# Altium footprint library amirlib.PcbLib: 456 footprints (part 7 of 29)
Each footprint in its own frame and in the unit in brackets; x right, y up, seen from the top. Pads: shape width x height; smd on the part's side, far side on the other; paste and mask are expansions set on the pad; w line width, h text height; cw(c..) or ccw(c..) is an arc to the next point about the centre after c.
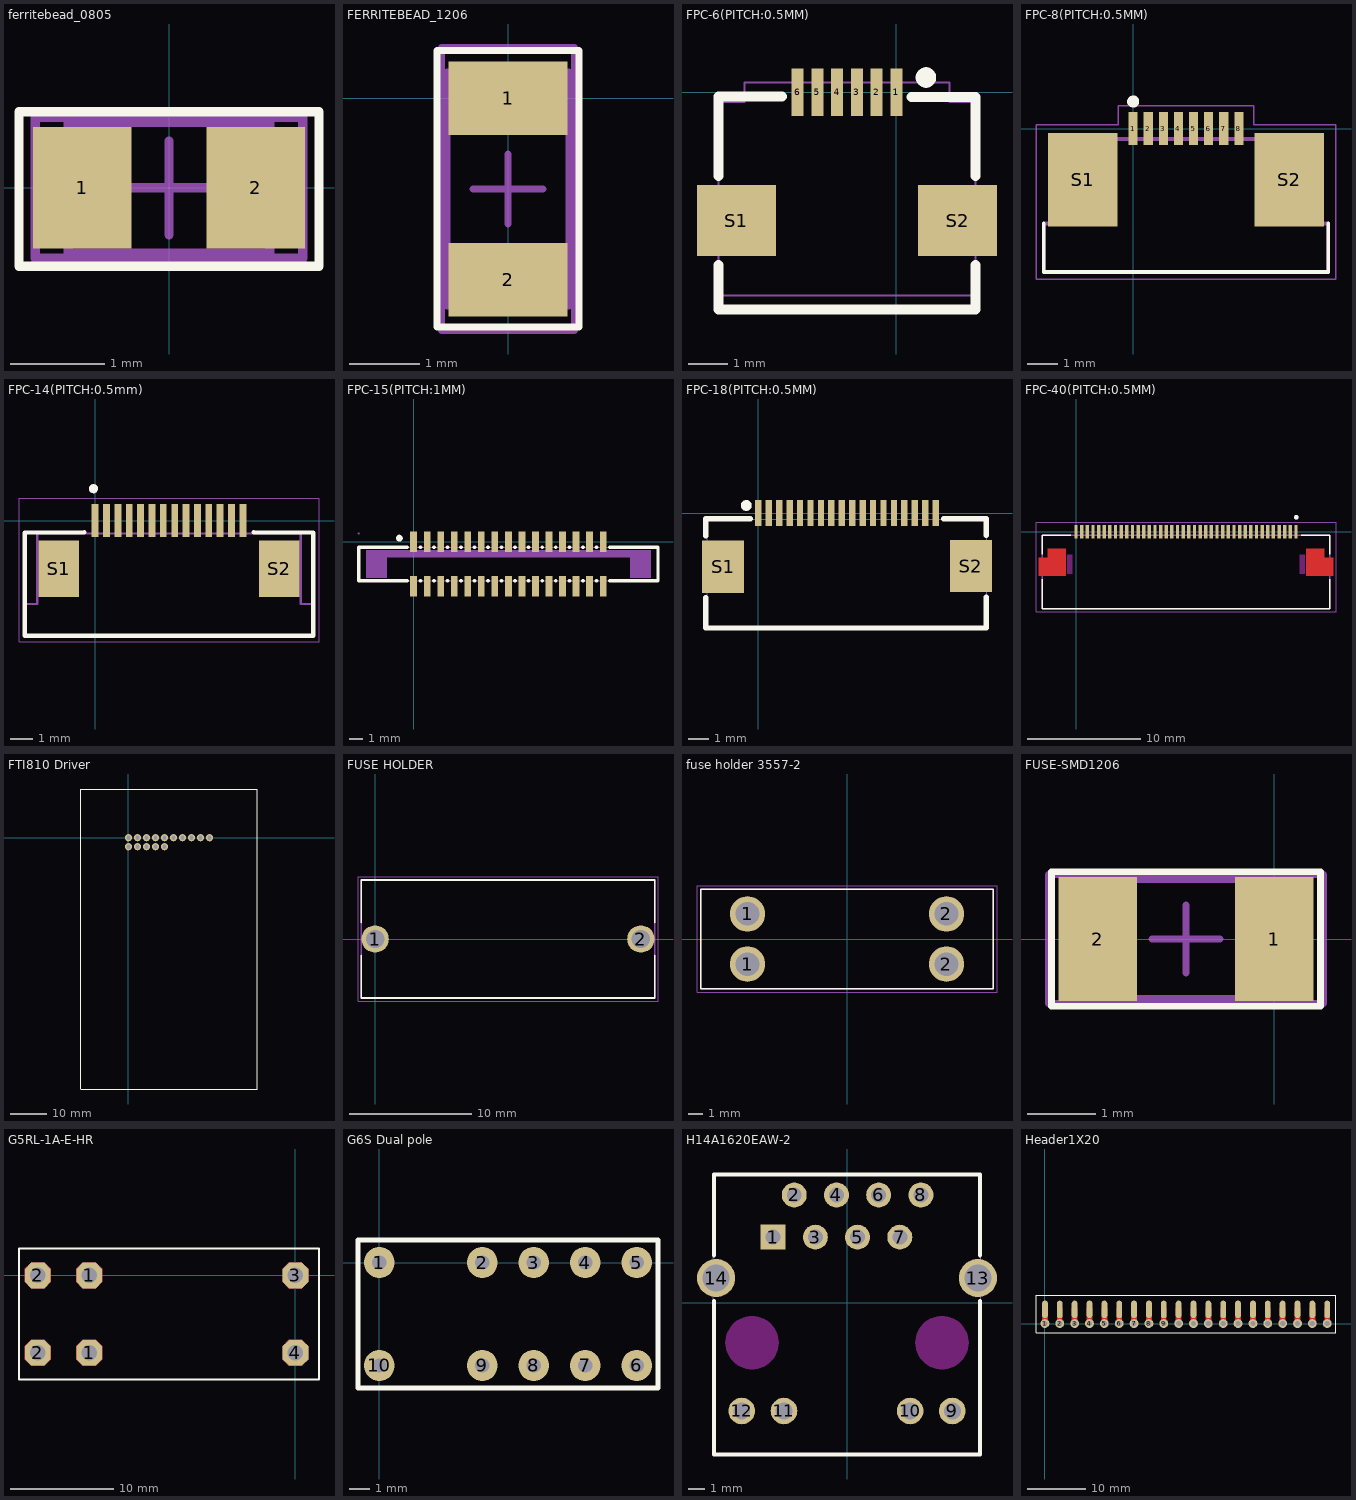
[diagram p6: the footprints below, top view; thin cyan lines are the x and y axes]

## ferritebead_0805 [mm]
pads (2):
  rect 1.05x1.3 smd: 1(-0.925,0) 2(0.925,0)
Top Overlay:
  lines w0.1: -1.6,-0.838 1.6,-0.838 1.6,0.813 -1.6,0.813 -1.6,-0.838
Mechanical 13:
  lines w0.1: -1.075,-0.7 -1.075,0.7 1.075,0.7 1.075,-0.7 -1.075,-0.7
Mechanical 15:
  lines w0.1: -0.5,0 0.5,0 ; 0,-0.5 0,0.5 ; -1.425,-0.75 -1.425,0.75 1.425,0.75 1.425,-0.75 -1.425,-0.75
3D body "0805.STEP": height 0.6, standoff 0, extent -1.016,-0.635 1.016,0.635

## FERRITEBEAD_1206 [mm]
pads (2):
  rect 1.7x1.05 smd: 1(0,0) 2(0,-2.596)
Top Overlay:
  lines w0.1: -1.016,-3.277 1.016,-3.277 1.016,0.686 -1.016,0.686 -1.016,-3.277
Mechanical 13:
  lines w0.1: -0.875,-2.973 0.875,-2.973 0.875,0.377 -0.875,0.377 -0.875,-2.973
Mechanical 15:
  lines w0.1: -0.5,-1.298 0.5,-1.298 ; 0,-1.798 0,-0.798 ; -0.95,-3.323 0.95,-3.323 0.95,0.727 -0.95,0.727 -0.95,-3.323
3D body "1206.STEP": height 0.6, standoff 0, extent -0.762,-2.822 0.762,0.226

## FPC-6(PITCH:0.5MM) [mm]
pads (8):
  rect 0.3x1.2 smd paste+0 mask+0.05: 1(0,0) 2(-0.5,0) 3(-1,0) 4(-1.5,0) 5(-2,0) 6(-2.5,0)
  rect 2x1.8 smd paste+0 mask+0.05: S1(-4.05,-3.25) S2(1.55,-3.25)
Top Overlay:
  circle w0.254: c0.75,0.375 r0.133
  lines w0.254: -4.5,-4.381 -4.5,-5.5 2,-5.5 2,-4.381 ; -4.5,-2.119 -4.5,-0.101 -2.901,-0.101 ; 0.381,-0.125 2,-0.125 2,-2.119
Mechanical 15:
  lines w0.051: -4.5,-5.15 -4.5,-0.25 -3.845,-0.25 -3.845,0.25 1.35,0.25 1.35,-0.25 2,-0.25 2,-5.15 -4.5,-5.15
3D body "FH12-6S-0.5SH--3DModel-STEP-1.STEP": height 2.14, standoff 0.04, extent -4.795,-6.096 2.305,0.304

## FPC-8(PITCH:0.5MM) [mm]
pads (10):
  rect 0.3x1.1 smd: 1(0,0) 2(0.5,0) 3(1,0) 4(1.5,0) 5(2,0) 6(2.5,0) 7(3,0) 8(3.5,0)
  rect 2.3x3.1 smd: S1(-1.67,-1.7) S2(5.17,-1.7)
Top Overlay:
  circle w0.2: c0,0.896 r0.1
  lines w0.127: -2.965,-3.15 -2.965,-4.75 6.465,-4.75 6.465,-3.15
Top 3D Body:
  lines w0.127: -2.965,-4.75 6.465,-4.75 ; -2.965,-4.75 -2.965,-3.15 ; -2.965,-4.75 6.465,-4.75 ; -2.965,-4.75 -2.965,-3.15 ; -2.965,-3.15 -2.31,-3.15 ; -2.965,-3.15 -2.31,-3.15 ; -2.31,-3.15 -2.31,-0.35 ; -2.31,-3.15 -2.31,-0.35 ; -2.31,-0.35 5.81,-0.35 ; -2.31,-0.35 5.81,-0.35 ; 5.81,-3.15 5.81,-0.35 ; 5.81,-3.15 6.465,-3.15 ; 5.81,-3.15 5.81,-0.35 ; 5.81,-3.15 6.465,-3.15 ; 6.465,-4.75 6.465,-3.15 ; 6.465,-4.75 6.465,-3.15
Mechanical 15:
  lines w0.05: -3.215,-5 -3.215,0.125 -0.5,0.125 -0.5,0.75 4,0.75 4,0.125 6.715,0.125 6.715,-5 -3.215,-5
3D body "FPC-8.stp": height 2.11, standoff 0, extent -2.4,-5.343 5.9,0.507

## FPC-14(PITCH:0.5mm) [mm]
pads (16):
  rect 0.3x1.45 smd: 1(0,0) 2(0.5,0) 3(1,0) 4(1.5,0) 5(2,0) 6(2.5,0) 7(3,0) 8(3.5,0) 9(4,0) 10(4.5,0) 11(5,0) 12(5.5,0) 13(6,0) 14(6.5,0)
  rect 1.8x2.5 smd: S1(-1.6,-2.125) S2(8.1,-2.125)
Top Overlay:
  circle w0.2: c-0.075,1.4 r0.1
  lines w0.2: -3.1,-0.559 -3.1,-5.075 9.6,-5.075 9.6,-0.533 6.97,-0.525 ; -3.099,-0.533 -0.47,-0.525
Mechanical 13:
  circle w0.2: c-0.075,1.4 r0.1
  lines w0.1: -3.1,-5.075 -3.1,-3.675 -2.55,-3.675 -2.55,-0.575 9.05,-0.575 9.05,-3.675 9.6,-3.675 9.6,-5.075 -3.1,-5.075
Mechanical 15:
  lines w0.05: -3.35,-5.325 -3.35,0.975 9.85,0.975 9.85,-5.325 -3.35,-5.325
3D body "FPC-14.stp": height 2.11, standoff 0, extent -2.4,-5.596 8.9,0.254

## FPC-15(PITCH:1MM) [mil]
pads (30):
  rect 19.7x59.1 smd paste+0 mask+2: 1(0,-129.9) 1(0,0) 2(39.4,-129.9) 2(39.4,0) 3(78.8,-129.9) 3(78.8,0) 4(118.1,-129.9) 4(118.1,0) 5(157.5,-129.9) 5(157.5,0) 6(196.9,-129.9) 6(196.9,0) 7(236.2,-129.9) 7(236.2,0) 8(275.6,-129.9) 8(275.6,0) 9(315,-129.9) 9(315,0) 10(354.3,-129.9) 10(354.3,0) 11(393.7,-129.9) 11(393.7,0) 12(433.1,-129.9) 12(433.1,0) 13(472.5,-129.9) 13(472.5,0) 14(511.8,-129.9) 14(511.8,0) 15(551.2,-129.9) 15(551.2,0)
Top Overlay:
  lines w10: -18.9,-114.1 -159.4,-114.1 -159.4,-15.7 -18.9,-15.7 ; 18.9,-114.1 20.4,-114.1 ; 19,-15.7 20.4,-15.7 ; 58.3,-114.1 59.8,-114.1 ; 58.3,-15.7 59.8,-15.7 ; 97.7,-114.1 99.2,-114.1 ; 97.7,-15.7 99.2,-15.7 ; 137.1,-114.1 138.5,-114.1 ; 137.1,-15.7 138.5,-15.7 ; 176.4,-114.1 177.9,-114.1 ; 176.4,-15.7 177.9,-15.7 ; 215.8,-114.1 217.3,-114.1 ; 215.8,-15.7 217.3,-15.7 ; 255.2,-114.1 256.7,-114.1 ; 255.2,-15.7 256.7,-15.7 ; 294.5,-114.1 296,-114.1 ; 294.5,-15.7 296,-15.7 ; 333.9,-114.1 335.4,-114.1 ; 333.9,-15.7 335.4,-15.7 ; 373.3,-114.1 374.8,-114.1 ; 373.3,-15.7 374.8,-15.7 ; 412.7,-114.1 414.1,-114.1 ; 412.7,-15.7 414.1,-15.7 ; 452,-114.1 453.5,-114.1 ; 452,-15.7 453.5,-15.7 ; 491.4,-114.1 492.9,-114.1 ; 491.4,-15.7 492.9,-15.7 ; 530.8,-114.1 532.2,-114.1 ; 530.8,-15.7 532.2,-15.7 ; 570.1,-114.1 710.6,-114.1 710.6,-15.7 570.1,-15.7 ; -46.2,10.1 -45.9,8.2 -44.8,6.6 -43.2,5.5 -41.2,5.1 -39.3,5.5 -37.7,6.6 -36.6,8.2 -36.2,10.1 -36.6,12 -37.7,13.6 -39.3,14.7 -41.2,15.1 -43.2,14.7 -44.8,13.6 -45.9,12 -46.2,10.1
Top Assembly:
  region: -98.4,-104.3 -137.8,-104.3 -137.8,-25.5 689,-25.5 689,-104.3 629.9,-104.3 629.9,-45.2 -78.7,-45.2 -78.7,-104.3
Mechanical 6:
  lines w2: -159.4,-114.1 -159.4,-15.7 710.6,-15.7 710.6,-114.1 -159.4,-114.1
Mechanical 8:
  region: -157.1,23.7 -157.5,22.4 -158.5,21.5 -159.8,21.3 -161,21.9 -161.7,23 -161.7,24.3 -161,25.5 -159.8,26 -158.5,25.8 -157.5,24.9
Mechanical 9:
  region: 191.9,23.7 201.8,23.7 201.8,-23.6 191.9,-23.6
  region: 231.3,23.7 241.2,23.7 241.2,-23.6 231.3,-23.6
  region: 270.7,23.7 280.5,23.7 280.5,-23.6 270.7,-23.6
  region: 310,23.7 319.9,23.7 319.9,-23.6 310,-23.6
  region: 349.4,23.7 359.3,23.7 359.3,-23.6 349.4,-23.6
  region: 388.8,23.7 398.6,23.7 398.6,-23.6 388.8,-23.6
  region: 428.2,23.7 438,23.7 438,-23.6 428.2,-23.6
  region: 467.5,23.7 477.4,23.7 477.4,-23.6 467.5,-23.6
  region: 506.9,23.7 516.7,23.7 516.7,-23.6 506.9,-23.6
  region: 546.3,23.7 556.1,23.7 556.1,-23.6 546.3,-23.6
  region: 546.3,-106.3 556.1,-106.3 556.1,-153.5 546.3,-153.5
  region: 506.9,-106.3 516.7,-106.3 516.7,-153.5 506.9,-153.5
  region: 467.5,-106.3 477.4,-106.3 477.4,-153.5 467.5,-153.5
  region: 428.2,-106.3 438,-106.3 438,-153.5 428.2,-153.5
  region: 388.8,-106.3 398.6,-106.3 398.6,-153.5 388.8,-153.5
  region: 349.4,-106.3 359.3,-106.3 359.3,-153.5 349.4,-153.5
  region: 310,-106.3 319.9,-106.3 319.9,-153.5 310,-153.5
  region: 270.7,-106.3 280.5,-106.3 280.5,-153.5 270.7,-153.5
  region: 231.3,-106.3 241.2,-106.3 241.2,-153.5 231.3,-153.5
  region: 191.9,-106.3 201.8,-106.3 201.8,-153.5 191.9,-153.5
  region: -4.9,-106.3 4.9,-106.3 4.9,-153.5 -4.9,-153.5
  region: 34.5,-106.3 44.3,-106.3 44.3,-153.5 34.5,-153.5
  region: 73.8,-106.3 83.7,-106.3 83.7,-153.5 73.8,-153.5
  region: 113.2,-106.3 123,-106.3 123,-153.5 113.2,-153.5
  region: 152.6,-106.3 162.4,-106.3 162.4,-153.5 152.6,-153.5
  region: 152.6,23.7 162.4,23.7 162.4,-23.6 152.6,-23.6
  region: 113.2,23.7 123,23.7 123,-23.6 113.2,-23.6
  region: 73.8,23.7 83.7,23.7 83.7,-23.6 73.8,-23.6
  region: 34.5,23.7 44.3,23.7 44.3,-23.6 34.5,-23.6
  region: -4.9,23.7 4.9,23.7 4.9,-23.6 -4.9,-23.6

## FPC-18(PITCH:0.5MM) [mm]
pads (20):
  rect 0.3x1.25 smd paste+0 mask+0.05: 1(0,0) 2(0.5,0) 3(1,0) 4(1.5,0) 5(2,0) 6(2.5,0) 7(3,0) 8(3.5,0) 9(4,0) 10(4.5,0) 11(5,0) 12(5.5,0) 13(6,0) 14(6.5,0) 15(7,0) 16(7.5,0) 17(8,0) 18(8.5,0)
  rect 2x2.5 smd paste+0 mask+0.05: S1(-1.69,-2.575) S2(10.19,-2.54)
Top Overlay:
  circle w0.254: c-0.577,0.363 r0.127
  circle w0.254: c-0.577,0.363 r0.127
  lines w0.254: -2.52,-4.056 -2.52,-5.508 10.92,-5.508 10.92,-4.021 ; -2.52,-1.094 -2.52,-0.268 -0.381,-0.268 ; 8.895,-0.268 10.92,-0.268 10.92,-1.059
Mechanical 6:
  circle w0.254: c-0.577,0.363 r0.127
Mechanical 15:
  lines w0.051: -2.45,-5.425 10.95,-5.425 10.95,-0.305 -2.45,-0.305 -2.45,-5.425
3D body "FPC-18.stp": height 2.11, standoff 0, extent -2.395,-5.317 10.905,0.533

## FPC-40(PITCH:0.5MM) [mm]
pads (42):
  rect 0.3x1.2 smd: 1(19.5,0) 2(19.001,0) 3(18.502,0) 4(18.001,0) 5(17.501,0) 6(17.001,0) 7(16.5,0) 8(16,0) 9(15.502,0) 10(15.002,0) 11(14.501,0) 12(14.001,0) 13(13.501,0) 14(13,0) 15(12.501,0) 16(12.002,0) 17(11.502,0) 18(11.001,0) 19(10.501,0) 20(10,0) 21(9.5,0) 22(9.001,0) 23(8.502,0) 24(8.001,0) 25(7.501,0) 26(7.001,0) 27(6.5,0) 28(6,0) 29(5.502,0) 30(5.002,0) 31(4.501,0) 32(4.001,0) 33(3.501,0) 34(3,0) 35(2.501,0) 36(2.002,0) 37(1.502,0) 38(1.001,0) 39(0.501,0) 40(0,0)
  round 0.025 smd: S1(-2.1,-2.7) S2(21.6,-2.7)
Top Layer:
  region: -3.3,-3.9 -0.9,-3.9 -0.9,-1.5 -2.5,-1.5 -2.5,-2.3 -3.3,-2.3
  region: 20.4,-3.9 20.4,-1.5 22,-1.5 22,-2.3 22.8,-2.3 22.8,-3.9
Top Overlay:
  circle w0.2: c19.533,1.27 r0.1
  lines w0.127: -3,-4.22 -3,-6.85 22.5,-6.85 22.5,-4.22 ; -3,-1.98 -3,-0.3 -0.47,-0.3 ; 19.97,-0.3 22.5,-0.3 22.5,-1.98
Keep-Out Layer:
  region: -0.35,-3.75 -0.767,-3.75 -0.767,-2.05 -0.35,-2.05
  region: 20.29,-3.75 19.85,-3.75 19.85,-2.05 20.29,-2.05
Mechanical 13:
  circle w0.2: c19.533,1.27 r0.1
  lines w0.127: -3,-6.85 -3,-0.3 22.5,-0.3 22.5,-6.85 -3,-6.85
Mechanical 15:
  lines w0.05: -3.55,-7.1 23.05,-7.1 23.05,0.85 -3.55,0.85 -3.55,-7.1
3D body "FPC-40.stp": height 2.11, standoff 0, extent -2.4,-5.588 21.9,0.262

## FTI810 Driver [mm]
pads (15):
  round 2 hole 1.2: 1(0,0) 2(2.5,0) 3(5,0) 4(7.5,0) 5(10,0) 6(12.5,0) 7(15,0) 8(17.5,0) 9(20,0) 10(22.5,0) 11(0,-2.5) 12(2.5,-2.5) 13(5,-2.5) 14(7.5,-2.5) 15(10,-2.5)
Top Overlay:
  lines w0.3: -13.2,-69.653 -13.2,13.5 35.699,13.5 ; -13.199,-69.7 35.7,-69.7 35.7,13.453

## FUSE HOLDER [mm]
pads (2):
  round 2.25 hole 1.5: 1(0,0) 2(21.84,0)
Top Overlay:
  lines w0.127: -1.16,-1.32 -1.16,-4.85 23,-4.85 23,-1.32 ; -1.16,1.32 -1.16,4.85 23,4.85 23,1.32
Mechanical 13:
  lines w0.127: -1.16,-4.85 23,-4.85 23,4.85 -1.16,4.85 -1.16,-4.85
Mechanical 15:
  lines w0.05: -1.41,-5.1 23.25,-5.1 23.25,5.1 -1.41,5.1 -1.41,-5.1
3D body "step_temp.STEP": height 10.79, standoff -4.17, extent -1.158,-4.851 22.998,4.851

## fuse holder 3557-2 [mm]
pads (4):
  round 2.4 hole 1.6: 1(-6.735,-1.7) 1(-6.735,1.7) 2(6.735,-1.7) 2(6.735,1.7)
Top Overlay:
  lines w0.127: -9.905,-3.365 -9.905,3.365 9.905,3.365 9.905,-3.365 -9.905,-3.365
Mechanical 13:
  lines w0.127: -9.905,-3.365 -9.905,3.365 9.905,3.365 9.905,-3.365 -9.905,-3.365
Mechanical 15:
  lines w0.05: -10.155,-3.615 10.155,-3.615 10.155,3.615 -10.155,3.615 -10.155,-3.615
3D body "step_temp.STEP": height 7.37, standoff -2.79, extent -9.905,-3.365 9.905,3.365

## FUSE-SMD1206 [mm]
pads (2):
  rect 1.16x1.82 smd: 1(0,0) 2(-2.596,0)
Top Overlay:
  lines w0.1: -3.279,-0.991 -3.279,0.991 0.683,0.991 0.683,-0.991 -3.279,-0.991
Mechanical 13:
  lines w0.1: -2.973,-0.875 -2.973,0.875 0.377,0.875 0.377,-0.875 -2.973,-0.875
Mechanical 15:
  lines w0.1: -1.798,0 -0.798,0 ; -1.298,-0.5 -1.298,0.5 ; -3.323,-0.95 -3.323,0.95 0.727,0.95 0.727,-0.95 -3.323,-0.95
3D body "step_temp.STEP": height 0.75, standoff 0, extent -2.898,-0.8 0.302,0.8

## G5RL-1A-E-HR [mm]
pads (6):
  oct 2.5x2.5 hole 1.5: 1(-20,-7.5) 1(-20,0) 2(-25,-7.5) 2(-25,0) 3(0,0) 4(0,-7.5)
Top Layer:
  region: -20.625,-1.25 -21.25,-0.625 -21.25,0.625 -20.625,1.25 -19.375,1.25 -18.75,0.625 -18.75,-0.625 -19.375,-1.25
  region: -20.625,-8.75 -21.25,-8.125 -21.25,-6.875 -20.625,-6.25 -19.375,-6.25 -18.75,-6.875 -18.75,-8.125 -19.375,-8.75
  region: -25.625,-1.25 -26.25,-0.625 -26.25,0.625 -25.625,1.25 -24.375,1.25 -23.75,0.625 -23.75,-0.625 -24.375,-1.25
  region: -0.625,-1.25 -1.25,-0.625 -1.25,0.625 -0.625,1.25 0.625,1.25 1.25,0.625 1.25,-0.625 0.625,-1.25
  region: -25.625,-8.75 -26.25,-8.125 -26.25,-6.875 -25.625,-6.25 -24.375,-6.25 -23.75,-6.875 -23.75,-8.125 -24.375,-8.75
  region: -0.625,-8.75 -1.25,-8.125 -1.25,-6.875 -0.625,-6.25 0.625,-6.25 1.25,-6.875 1.25,-8.125 0.625,-8.75
Bottom Layer:
  region: -20.625,-1.25 -21.25,-0.625 -21.25,0.625 -20.625,1.25 -19.375,1.25 -18.75,0.625 -18.75,-0.625 -19.375,-1.25
  region: -20.625,-8.75 -21.25,-8.125 -21.25,-6.875 -20.625,-6.25 -19.375,-6.25 -18.75,-6.875 -18.75,-8.125 -19.375,-8.75
  region: -25.625,-1.25 -26.25,-0.625 -26.25,0.625 -25.625,1.25 -24.375,1.25 -23.75,0.625 -23.75,-0.625 -24.375,-1.25
  region: -0.625,-1.25 -1.25,-0.625 -1.25,0.625 -0.625,1.25 0.625,1.25 1.25,0.625 1.25,-0.625 0.625,-1.25
  region: -25.625,-8.75 -26.25,-8.125 -26.25,-6.875 -25.625,-6.25 -24.375,-6.25 -23.75,-6.875 -23.75,-8.125 -24.375,-8.75
  region: -0.625,-8.75 -1.25,-8.125 -1.25,-6.875 -0.625,-6.25 0.625,-6.25 1.25,-6.875 1.25,-8.125 0.625,-8.75
Top Overlay:
  lines w0.2: -26.822,-10.084 2.286,-10.084 2.286,2.591 -26.822,2.591 -26.822,-10.084
3D body "G5RL-1A-E-HR DC12--3DModel-STEP-1.STEP": height 15.7, standoff -3.5, extent -26.7,-10.1 2.3,2.6

## G6S Dual pole [mil]
pads (10):
  round 60 hole 27.56: 1(0,0) 2(200,0) 3(300,0) 4(400,0) 5(500,0) 6(500,-200) 7(400,-200) 8(300,-200) 9(200,-200) 10(0,-200)
Top Overlay:
  lines w10: -41.34,-243.7 541.34,-243.7 541.34,43.7 -41.34,43.7 -41.34,-243.7
3D body "g6s-2_4_5dc.stp": height 362.2, standoff -116.14, extent -41.33,-245.69 541.35,41.71

## H14A1620EAW-2 [mil]
pads (14):
  rect 59.1x59.1 hole 35.4: 1(-174.95,155.9)
  round 59.1 hole 35.4: 2(-124.95,255.9) 3(-74.95,155.9) 4(-24.95,255.9) 5(25.05,155.9) 6(75.05,255.9) 7(125.05,155.9) 8(175.05,255.9)
  round 63 hole 40.2: 9(249.45,-255.9) 10(149.45,-255.9) 11(-149.35,-255.9) 12(-249.35,-255.9)
  round 90.6 hole 64.2: 13(310.05,59.1) 14(-310.05,59.1)
Top Overlay:
  lines w10: -314.95,4.9 -314.95,-359 314.95,-359 314.95,4.9 ; -314.95,113.2 -314.95,304.3 314.95,304.3 314.95,113.2
Keep-Out Layer:
  board cut-out: -287.95,-94.1 -287.55,-87 -286.35,-80.1 -284.45,-73.3 -281.75,-66.7 -278.35,-60.6 -274.25,-54.8 -269.55,-49.5 -264.25,-44.8 -258.45,-40.7 -252.25,-37.3 -245.75,-34.6 -238.95,-32.7 -232.05,-31.5 -224.95,-31.1 -217.95,-31.5 -210.95,-32.7 -204.15,-34.6 -197.65,-37.3 -191.45,-40.7 -185.65,-44.8 -180.45,-49.5 -175.75,-54.8 -171.65,-60.6 -168.25,-66.7 -165.55,-73.3 -163.55,-80.1 -162.35,-87 -161.95,-94.1 -162.35,-101.1 -163.55,-108.1 -165.55,-114.9 -168.25,-121.4 -171.65,-127.6 -175.75,-133.4 -180.45,-138.6 -185.65,-143.3 -191.45,-147.4 -197.65,-150.8 -204.15,-153.5 -210.95,-155.5 -217.95,-156.7 -224.95,-157.1 -232.05,-156.7 -238.95,-155.5 -245.75,-153.5 -252.25,-150.8 -258.45,-147.4 -264.25,-143.3 -269.55,-138.6 -274.25,-133.4 -278.35,-127.6 -281.75,-121.4 -284.45,-114.9 -286.35,-108.1 -287.55,-101.1
  board cut-out: 162.05,-94.1 162.45,-87 163.65,-80.1 165.55,-73.3 168.25,-66.7 171.65,-60.6 175.75,-54.8 180.45,-49.5 185.75,-44.8 191.55,-40.7 197.75,-37.3 204.25,-34.6 211.05,-32.7 217.95,-31.5 225.05,-31.1 232.05,-31.5 239.05,-32.7 245.85,-34.6 252.35,-37.3 258.55,-40.7 264.35,-44.8 269.55,-49.5 274.25,-54.8 278.35,-60.6 281.75,-66.7 284.45,-73.3 286.45,-80.1 287.65,-87 288.05,-94.1 287.65,-101.1 286.45,-108.1 284.45,-114.9 281.75,-121.4 278.35,-127.6 274.25,-133.4 269.55,-138.6 264.35,-143.3 258.55,-147.4 252.35,-150.8 245.85,-153.5 239.05,-155.5 232.05,-156.7 225.05,-157.1 217.95,-156.7 211.05,-155.5 204.25,-153.5 197.75,-150.8 191.55,-147.4 185.75,-143.3 180.45,-138.6 175.75,-133.4 171.65,-127.6 168.25,-121.4 165.55,-114.9 163.65,-108.1 162.45,-101.1
Mechanical 6:
  lines w2: -316.85,-359 316.95,-359 316.95,304.3 -316.85,304.3 -316.85,-359
Mechanical 8:
  region: -319.25,304.3 -318.85,305.6 -317.85,306.5 -316.55,306.7 -315.35,306.1 -314.65,305 -314.65,303.7 -315.35,302.6 -316.55,302 -317.85,302.2 -318.85,303.1

## Header1X20 [mm]
pads (40):
  round 1.5 hole 0.9: 1(0,0) 2(2.537,0) 3(5.075,0) 4(7.612,0) 5(10.149,0) 6(12.687,0) 7(15.224,0) 8(17.761,0) 9(20.299,0) 10(22.836,0) 11(25.373,0) 12(27.911,0) 13(30.448,0) 14(32.985,0) 15(35.523,0) 16(38.06,0) 17(40.597,0) 18(43.135,0) 19(45.672,0) 20(48.209,0)
  oval 1x3 smd: 1(0,2.413) 2(2.537,2.413) 3(5.075,2.413) 4(7.612,2.413) 5(10.149,2.413) 6(12.687,2.413) 7(15.224,2.413) 8(17.761,2.413) 9(20.299,2.413) 10(22.836,2.413) 11(25.373,2.413) 12(27.911,2.413) 13(30.448,2.413) 14(32.985,2.413) 15(35.523,2.413) 16(38.06,2.413) 17(40.597,2.413) 18(43.135,2.413) 19(45.672,2.413) 20(48.209,2.413)
Top Layer:
  lines w1: 0,0 0.025,2.108 ; 2.537,0 2.537,2.413 ; 5.075,0 5.075,2.413 ; 7.612,0 7.612,2.413 ; 10.149,0 10.149,2.413 ; 12.687,0 12.687,2.413 ; 15.224,0 15.224,2.413 ; 17.761,0 17.761,2.413 ; 20.299,0 20.299,2.413 ; 22.836,0 22.836,2.413 ; 25.373,0 25.373,2.413 ; 27.911,0 27.911,2.413 ; 30.448,0 30.448,2.413 ; 32.985,0 32.985,2.413 ; 35.523,0 35.523,2.413 ; 38.06,0 38.06,2.413 ; 40.597,0 40.597,2.413 ; 43.135,0 43.135,2.413 ; 45.672,0 45.672,2.413 ; 48.209,0 48.209,2.413
Top Overlay:
  lines w0.2: -1.524,-1.549 -1.524,4.8 49.632,4.8 49.632,-1.549 -1.524,-1.549